# EAGLE library part IC16 (library ics)
Generic integrated circuit, 16 pins
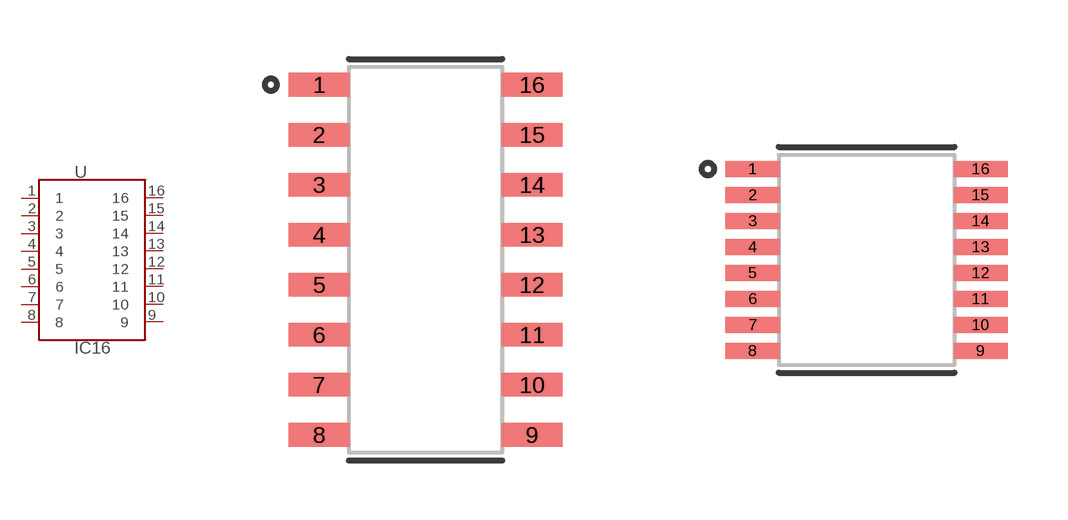
[diagram p2: symbol with the pads of SOIC-16; footprints SOIC-16, TSSOP-16]

Designator prefix U

## IC16SOIC  [SOIC-16]
1  1  pas
2  2  pas
3  3  pas
4  4  pas
5  5  pas
6  6  pas
7  7  pas
8  8  pas
9  9  pas
10  10  pas
11  11  pas
12  12  pas
13  13  pas
14  14  pas
15  15  pas
16  16  pas

## IC16TSSOP  [TSSOP-16]
Pads as for SOIC-16

## Footprint SOIC-16 (pad centres in mm)
Small outline package, 16 pins, pitch 1.27 mm, body 3.9 mm. Sizes: JEDEC MS-012 nominal sizes; pads worked out for this kit. Not verified against a datasheet.
smd 1.55 x 0.6: 1 -2.7,4.445; 2 -2.7,3.175; 3 -2.7,1.905; 4 -2.7,0.635; 5 -2.7,-0.635; 6 -2.7,-1.905; 7 -2.7,-3.175; 8 -2.7,-4.445; 9 2.7,-4.445; 10 2.7,-3.175; 11 2.7,-1.905; 12 2.7,-0.635; 13 2.7,0.635; 14 2.7,1.905; 15 2.7,3.175; 16 2.7,4.445

## Footprint TSSOP-16 (pad centres in mm)
Thin shrink small outline package, 16 pins, pitch 0.65 mm, body 4.4 mm. Sizes: JEDEC MO-153 nominal sizes; pads worked out for this kit. Not verified against a datasheet.
smd 1.35 x 0.4: 1 -2.85,2.275; 2 -2.85,1.625; 3 -2.85,0.975; 4 -2.85,0.325; 5 -2.85,-0.325; 6 -2.85,-0.975; 7 -2.85,-1.625; 8 -2.85,-2.275; 9 2.85,-2.275; 10 2.85,-1.625; 11 2.85,-0.975; 12 2.85,-0.325; 13 2.85,0.325; 14 2.85,0.975; 15 2.85,1.625; 16 2.85,2.275